# Altium footprint library 53047-0310.PcbLib: 1 footprints
Each footprint in its own frame and in the unit in brackets; x right, y up, seen from the top. Pads: shape width x height; smd on the part's side, far side on the other; paste and mask are expansions set on the pad; w line width, h text height; cw(c..) or ccw(c..) is an arc to the next point about the centre after c.
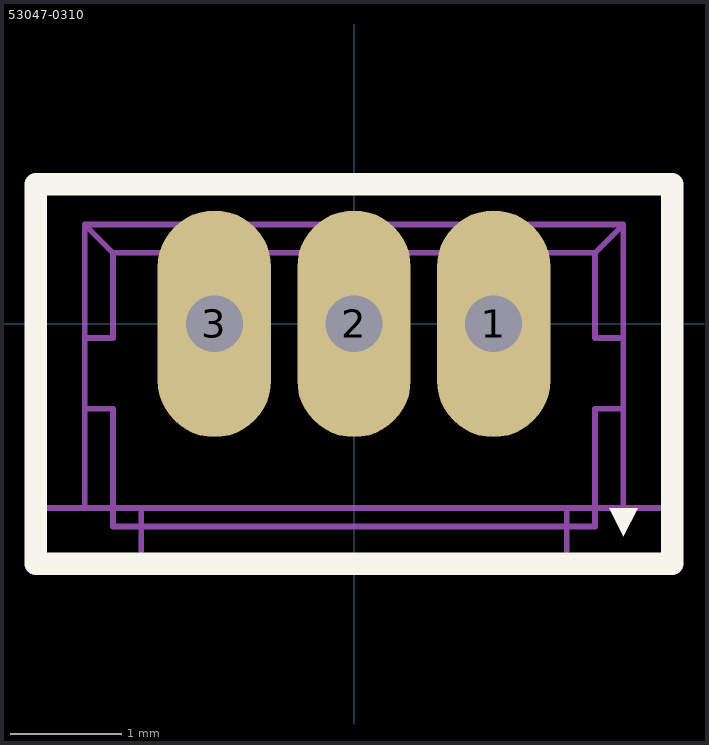
[diagram p0: the footprint, top view; thin cyan lines are the x and y axes]

## 53047-0310 [mil]
pads (3):
  oval 40x80 hole 20: 1(49.21,0) 2(0,0) 3(-49.21,0)
Top Overlay:
  region: 95,-75 90,-65 100,-65
  lines w8: -112.2,-84.65 112.2,-84.65 112.2,49.21 -112.2,49.21 -112.2,-84.65
Mechanical 13:
  region: -39.21,-20 -59.21,-20 -59.21,20 -39.21,20
  region: 10,-20 -10,-20 -10,20 10,20
  region: 59.21,-20 39.21,-20 39.21,20 59.21,20
  lines w2: -108.94,-65 -95,-65 ; -75,-80 -75,-65 ; 75,-80 75,-65 ; 108.94,-65 95,-65 ; -95,-65 -85,-65 ; -95,-65 -95,-30 ; -95,-30 -95,-5 ; -95,-30 -85,-30 -85,-65 ; -95,-5 -95,35 ; -95,-5 -85,-5 -85,25 ; -95,35 95,35 ; -95,35 -85,25 ; -85,-65 -75,-65 ; -85,-65 -85,-71.5 85,-71.5 85,-65 ; -85,25 85,25 ; -75,-65 75,-65 ; 75,-65 85,-65 ; 85,-65 95,-65 ; 85,-65 85,-30 95,-30 ; 85,25 85,-5 95,-5 ; 85,25 95,35 ; 95,-65 95,-30 ; 95,-30 95,-5 ; 95,-5 95,35